# EAGLE library part SS-90000-009 (library SS-90000-009)
Jack Modular Connector 8p8c (RJ45, Ethernet) 90 Angle (Right) Shielded, EMI Finger Source: Datasheet <https://www.belfuse.com/resources/drawings/stewartconnector/dr-STW-SS-90000-009.pdf>
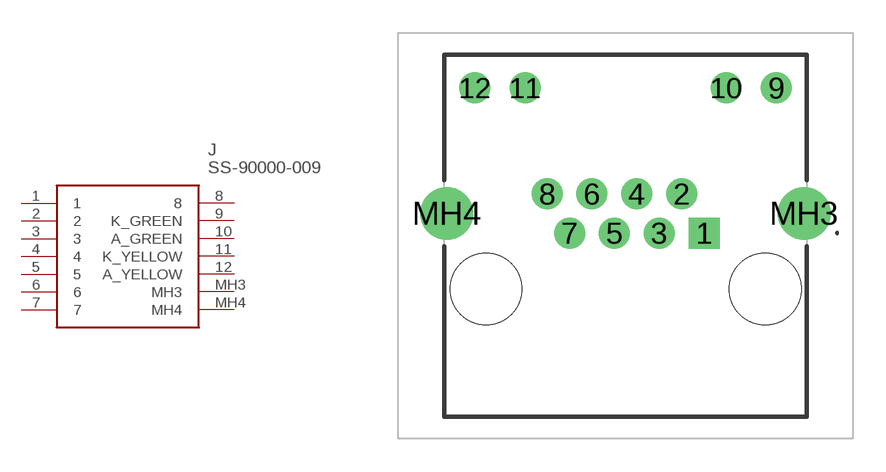
[diagram p0: symbol with the pads of SS90000009; footprint SS90000009]

Designator prefix J

## SS-90000-009 (Description: Jack Modular Connector 8p8c (RJ45, Ethernet) 90 Angle (Right) Shielded, EMI Finger; Height: 13.38mm; Manufacturer_Name: Bel; Manufacturer_Part_Number: SS-90000-009)  [SS90000009]
1  1
2  2
3  3
4  4
5  5
6  6
7  7
8  8
9  K_GREEN
10  A_GREEN
11  K_YELLOW
12  A_YELLOW
MH3  MH3
MH4  MH4

## Footprint SS90000009 (pad centres in mm)
SS-90000-009-2
drill 0.9 pad 1.4 square: 1 0,0
drill 0.9 pad 1.4: 2 -1.02,1.78; 3 -2.04,0; 4 -3.06,1.78; 5 -4.08,0; 6 -5.1,1.78; 7 -6.12,0; 8 -7.14,1.78; 9 3.29,6.6; 10 1,6.6; 11 -8.14,6.6; 12 -10.43,6.6
drill 1.6 pad 2.4: MH3 4.55,0.89; MH4 -11.7,0.89
hole 3.25 at 2.78,-2.54
hole 3.25 at -9.92,-2.54